# Altium schematic symbol library 100k trimmer tempory.SchLib: 1 symbol
Pins are listed as number, name and electrical type; pins without a type are passive.

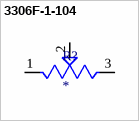
[diagram p0: symbol 3306F-1-104]

## 3306F-1-104
designator R?
TRIMMER - 6MM ROUND, SINGLE-TURN,CERMET, 100K OHMS | Bourns 3306F-1-104; SnapEDA_Link: https://www.snapeda.com/parts/3306F-1-104/Bourns/view-part/?ref=snap; Package: 3306F Bourns; Value: *; MF: Bourns; MP: 3306F-1-104; Check_prices: https://www.snapeda.com/parts/3306F-1-104/Bourns/view-part/?ref=eda
footprint TRIM_3306F-1-104
pins: 1 CCW, 2 W, 3 CW